# Altium footprint library PcbLib1.PcbLib: 47 footprints (part 3 of 3)
Each footprint in its own frame and in the unit in brackets; x right, y up, seen from the top. Pads: shape width x height; smd on the part's side, far side on the other; paste and mask are expansions set on the pad; w line width, h text height; cw(c..) or ccw(c..) is an arc to the next point about the centre after c.
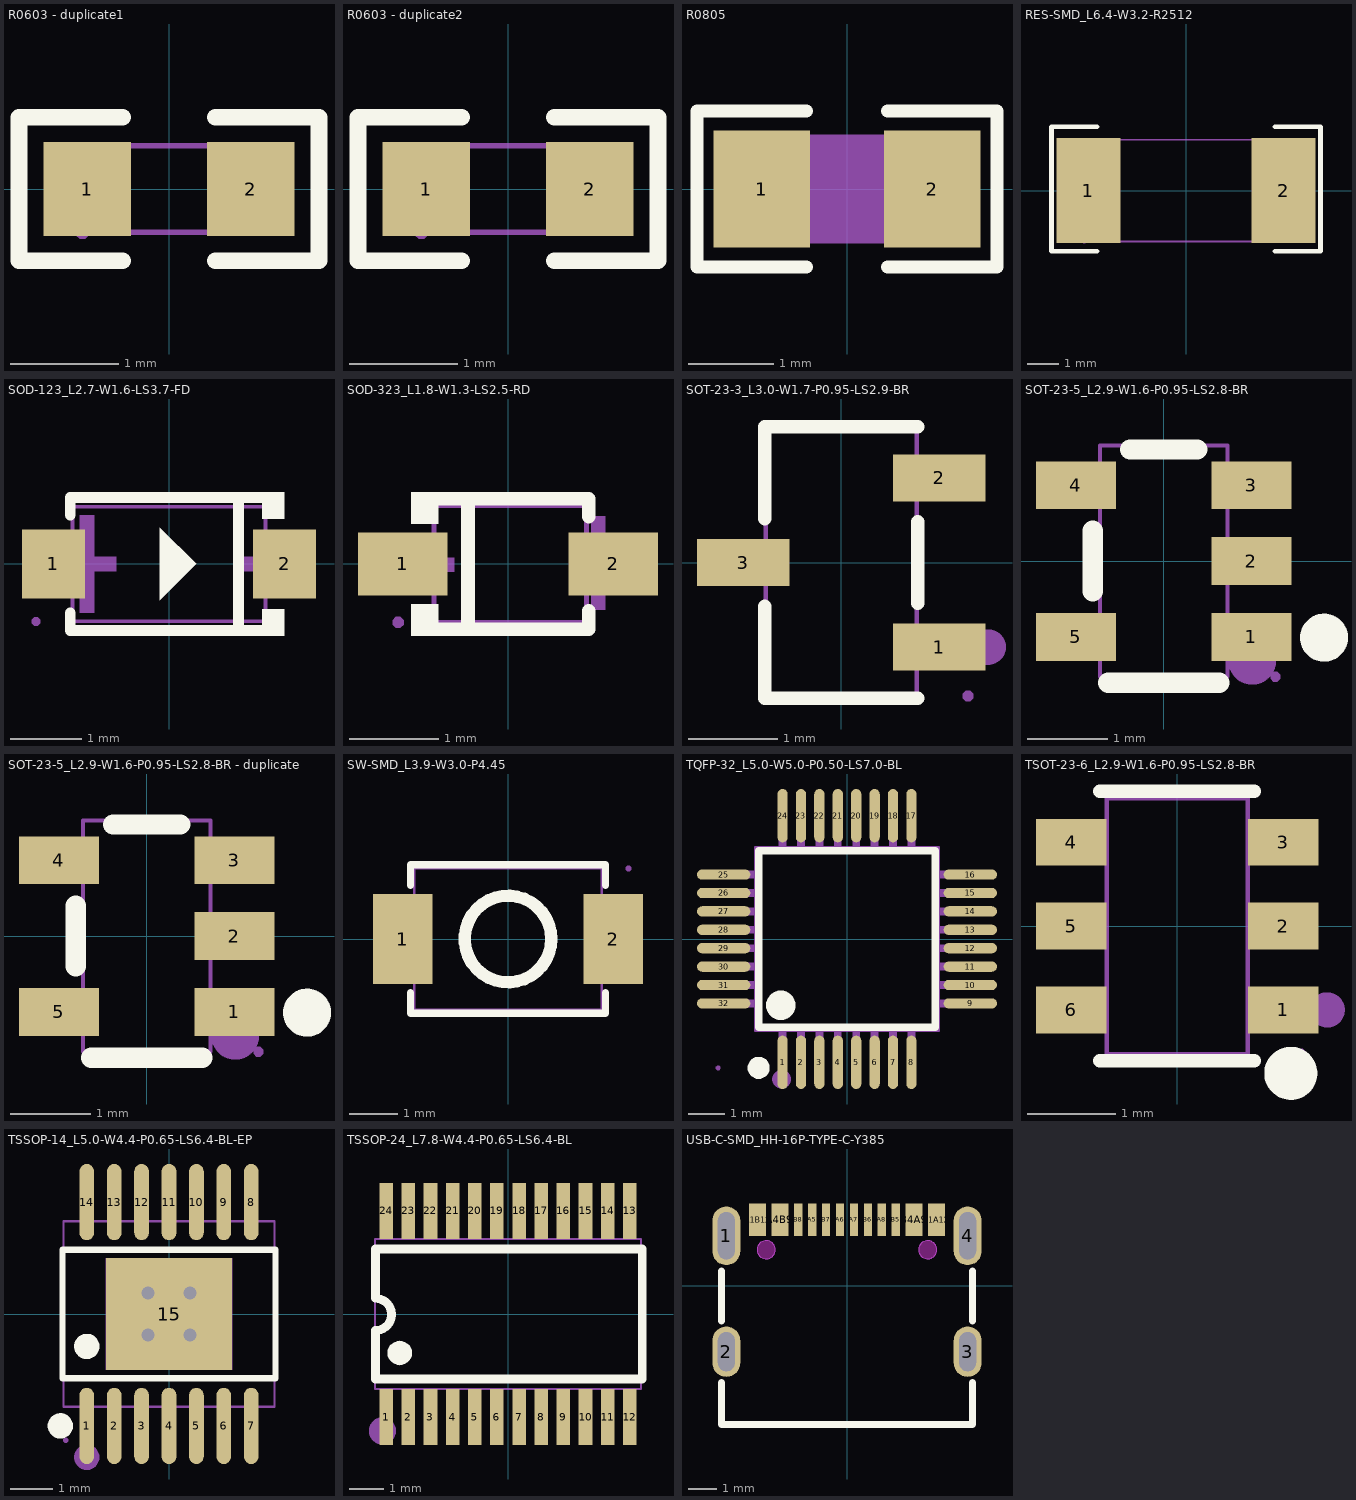
[diagram p2: the footprints below, top view; thin cyan lines are the x and y axes]

## R0603 - duplicate1 [mm]
pads (2):
  rect 0.806x0.864 smd paste-100 mask+0.051: 1(-0.753,0) 2(0.753,0)
Top Overlay:
  lines w0.152: -0.426,-0.661 -1.385,-0.661 -1.385,0.661 -0.426,0.661 ; 0.426,-0.661 1.385,-0.661 1.385,0.661 0.426,0.661
Top Paste:
  region: -1.195,-0.45 -0.395,-0.45 -0.345,-0.4 -0.345,-0.172 -0.715,-0.172 -0.715,0.158 -0.345,0.158 -0.345,0.4 -0.395,0.45 -1.195,0.45 -1.245,0.4 -1.245,-0.4
  region: 1.195,0.45 0.395,0.45 0.345,0.4 0.345,0.172 0.715,0.172 0.715,-0.158 0.345,-0.158 0.345,-0.4 0.395,-0.45 1.195,-0.45 1.245,-0.4 1.245,0.4
Mechanical 6:
  lines w0.051: -0.8,-0.4 0.8,-0.4 0.8,0.4 -0.8,0.4 -0.8,-0.4
Mechanical 8:
  region: -0.74,-0.4 -0.74,-0.425 -0.775,-0.46 -0.825,-0.46 -0.86,-0.425 -0.86,-0.4 -0.86,-0.375 -0.825,-0.34 -0.775,-0.34 -0.74,-0.375 -0.74,-0.4
Mechanical 9:
  region: 0.8,-0.4 0.8,0.4 0.5,0.4 0.5,-0.4
  region: -0.8,-0.4 -0.8,0.4 -0.5,0.4 -0.5,-0.4

## R0603 - duplicate2 [mm]
pads (2):
  rect 0.806x0.864 smd paste-100 mask+0.051: 1(-0.753,0) 2(0.753,0)
Top Overlay:
  lines w0.152: -0.426,-0.661 -1.385,-0.661 -1.385,0.661 -0.426,0.661 ; 0.426,-0.661 1.385,-0.661 1.385,0.661 0.426,0.661
Top Paste:
  region: 1.195,0.45 0.395,0.45 0.345,0.4 0.345,0.172 0.715,0.172 0.715,-0.158 0.345,-0.158 0.345,-0.4 0.395,-0.45 1.195,-0.45 1.245,-0.4 1.245,0.4
  region: -1.195,-0.45 -0.395,-0.45 -0.345,-0.4 -0.345,-0.172 -0.715,-0.172 -0.715,0.158 -0.345,0.158 -0.345,0.4 -0.395,0.45 -1.195,0.45 -1.245,0.4 -1.245,-0.4
Mechanical 6:
  lines w0.051: -0.8,-0.4 -0.8,0.4 0.8,0.4 0.8,-0.4 -0.8,-0.4
Mechanical 8:
  region: -0.74,-0.4 -0.74,-0.425 -0.775,-0.46 -0.825,-0.46 -0.86,-0.425 -0.86,-0.4 -0.86,-0.375 -0.825,-0.34 -0.775,-0.34 -0.74,-0.375 -0.74,-0.4
Mechanical 9:
  region: -0.8,-0.4 -0.8,0.4 -0.5,0.4 -0.5,-0.4
  region: 0.8,-0.4 0.8,0.4 0.5,0.4 0.5,-0.4

## R0805 [mm]
pads (2):
  rect 1.133x1.377 smd paste-100 mask+0.051: 1(-1,0) 2(1,0)
Top Overlay:
  lines w0.152: -0.476,-0.917 -1.761,-0.917 -1.761,0.917 -0.476,0.917 ; 0.476,-0.917 1.761,-0.917 1.761,0.917 0.476,0.917
Top Paste:
  region: 0.45,-0.64 0.45,-0.22 0.895,-0.22 0.895,0.23 0.455,0.23 0.45,0.64 0.5,0.69 1.65,0.69 1.7,0.64 1.7,-0.64 1.65,-0.69 0.5,-0.69
  region: -1.7,-0.64 -1.7,0.64 -1.65,0.69 -0.5,0.69 -0.45,0.64 -0.445,0.23 -0.895,0.23 -0.895,-0.22 -0.455,-0.22 -0.45,-0.64 -0.5,-0.69 -1.65,-0.69
Mechanical 9:
  region: -1,-0.637 -1,0.637 1,0.637 1,-0.637
Mechanical 11:
  region: -0.97,-0.638 -0.97,-0.65 -0.988,-0.668 -1.012,-0.668 -1.03,-0.65 -1.03,-0.638 -1.03,-0.625 -1.012,-0.608 -0.988,-0.608 -0.97,-0.625 -0.97,-0.638
Mechanical 12:
  region: 1,-0.637 1,0.637 0.6,0.637 0.6,-0.637
  region: -1,-0.637 -1,0.637 -0.6,0.637 -0.6,-0.637

## RES-SMD_L6.4-W3.2-R2512 [mm]
pads (2):
  rect 2x3.3 smd: 1(-3.066,0) 2(3.066,0)
Top Overlay:
  lines w0.152: -2.794,-1.905 -4.229,-1.905 -4.229,2.008 -2.794,2.008 ; 2.794,-1.905 4.229,-1.905 4.229,2.008 2.794,2.008
Mechanical 6:
  lines w0.051: -3.2,-1.6 -3.2,1.6 3.2,1.6 3.2,-1.6 -3.2,-1.6
Mechanical 8:
  region: -3.14,-1.6 -3.14,-1.625 -3.175,-1.66 -3.225,-1.66 -3.26,-1.625 -3.26,-1.6 -3.26,-1.575 -3.225,-1.54 -3.175,-1.54 -3.14,-1.575 -3.14,-1.6
Mechanical 9:
  region: -3.199,1.6 -2.299,1.6 -2.299,-1.6 -3.199,-1.6
  region: 2.299,1.6 3.199,1.6 3.199,-1.6 2.299,-1.6

## SOD-123_L2.7-W1.6-LS3.7-FD [mm]
pads (2):
  rect 0.88x0.96 smd: 1(-1.61,0) 2(1.61,0)
Top Overlay:
  region: 0.381,0 -0.127,0.508 -0.127,-0.508
  region: 1.3,1.002 1.3,0.632 1.605,0.632 1.605,1.002
  region: 1.3,-1.003 1.3,-0.632 1.605,-0.633 1.605,-1.003
  lines w0.152: -1.376,-0.683 -1.376,-0.926 1.376,-0.926 ; -1.376,0.683 -1.376,0.926 1.376,0.926 ; 0.967,-0.926 0.967,0.926
Mechanical 2:
  region: -1.245,-0.68 -1.245,0.68 -1.041,0.68 -1.041,-0.68
  region: -1.551,-0.102 -1.551,0.102 -0.735,0.102 -0.735,-0.102
  region: 1.805,-0.102 1.805,0.102 0.989,0.102 0.989,-0.102
Mechanical 6:
  lines w0.051: -1.345,-0.8 -1.345,0.8 1.345,0.8 1.345,-0.8 -1.345,-0.8
Mechanical 7:
  region: -1.511,0.3 -1.511,-0.3 -1.34,-0.3 -1.34,0.3
  region: 1.511,-0.3 1.511,0.3 1.34,0.3 1.34,-0.3
Mechanical 8:
  region: -1.791,-0.8 -1.791,-0.825 -1.826,-0.86 -1.876,-0.86 -1.911,-0.825 -1.911,-0.8 -1.911,-0.775 -1.876,-0.74 -1.826,-0.74 -1.791,-0.775 -1.791,-0.8
Mechanical 9:
  region: -1.851,0.3 -1.501,0.3 -1.501,-0.3 -1.851,-0.3
  region: 1.851,-0.3 1.501,-0.3 1.501,0.3 1.851,0.3

## SOD-323_L1.8-W1.3-LS2.5-RD [mm]
pads (2):
  rect 1x0.7 smd: 1(-1.172,0) 2(1.172,0)
Top Overlay:
  region: -0.775,-0.803 -0.775,-0.45 -1.08,-0.45 -1.08,-0.803
  region: -0.775,0.802 -0.775,0.45 -1.08,0.45 -1.08,0.802
  lines w0.152: -0.851,-0.726 0.901,-0.726 0.901,-0.52 ; -0.851,0.726 0.901,0.726 0.901,0.53 ; -0.447,-0.726 -0.447,0.726
Mechanical 2:
  region: 1.083,0.53 1.083,-0.51 0.927,-0.51 0.927,0.53
  region: 1.315,0.09 1.315,-0.066 0.691,-0.066 0.691,0.09
  region: -1.225,0.07 -1.225,-0.086 -0.601,-0.086 -0.601,0.07
Mechanical 6:
  lines w0.051: -0.825,-0.65 0.875,-0.65 0.875,0.65 -0.825,0.65 -0.825,-0.65
Mechanical 7:
  region: -0.815,0.16 -0.815,-0.16 -0.935,-0.16 -0.935,0.16
  region: 0.985,0.16 0.985,-0.16 0.865,-0.16 0.865,0.16
Mechanical 8:
  region: -1.165,-0.65 -1.165,-0.675 -1.2,-0.71 -1.25,-0.71 -1.285,-0.675 -1.285,-0.65 -1.285,-0.625 -1.25,-0.59 -1.2,-0.59 -1.165,-0.625 -1.165,-0.65
Mechanical 9:
  region: -0.925,0.16 -0.925,-0.16 -1.225,-0.16 -1.225,0.16
  region: 1.275,0.16 1.275,-0.16 0.975,-0.16 0.975,0.16

## SOT-23-3_L3.0-W1.7-P0.95-LS2.9-BR [mm]
pads (3):
  rect 1.037x0.532 smd: 1(1.101,-0.95) 2(1.101,0.95) 3(-1.101,0)
Top Overlay:
  lines w0.152: -0.859,-0.495 -0.859,-1.526 0.859,-1.526 ; -0.859,0.495 -0.859,1.526 0.859,1.526 ; 0.859,-0.455 0.859,0.455
Mechanical 2:
  circle w0.2: c1.65,-0.95 r0.1
Mechanical 6:
  lines w0.051: -0.85,-1.5 -0.85,1.5 0.85,1.5 0.85,-1.5 -0.85,-1.5
Mechanical 7:
  region: 0.815,-1.137 0.815,-0.762 1.01,-0.762 1.01,-1.137
  region: 0.815,0.762 0.815,1.137 1.01,1.137 1.01,0.762
  region: -1.01,-0.188 -1.01,0.188 -0.815,0.188 -0.815,-0.188
Mechanical 8:
  region: 1.485,-1.5 1.485,-1.525 1.45,-1.56 1.4,-1.56 1.365,-1.525 1.365,-1.5 1.365,-1.475 1.4,-1.44 1.45,-1.44 1.485,-1.475 1.485,-1.5
Mechanical 9:
  region: 1,-1.137 1,-0.762 1.425,-0.762 1.425,-1.137
  region: 1,0.762 1,1.137 1.425,1.137 1.425,0.762
  region: -1.425,-0.188 -1.425,0.188 -1,0.188 -1,-0.188

## SOT-23-5_L2.9-W1.6-P0.95-LS2.8-BR [mm]
pads (5):
  rect 1x0.6 smd paste+0 mask+0.05: 1(1.1,-0.95) 2(1.1,0) 3(1.1,0.95) 4(-1.1,0.95) 5(-1.1,-0.95)
Top Overlay:
  circle w0.3: c2.01,-0.96 r0.15
  lines w0.254: -0.889,-0.381 -0.889,0.381 ; -0.699,-1.524 0.698,-1.524 ; -0.422,1.397 0.422,1.397
Mechanical 2:
  circle w0.3: c1.11,-1.25 r0.15
Mechanical 6:
  lines w0.051: -0.8,-1.45 -0.8,1.45 0.8,1.45 0.8,-1.45 -0.8,-1.45
Mechanical 7:
  region: 0.96,-0.2 0.79,-0.2 0.79,0.2 0.96,0.2
  region: 0.96,0.75 0.79,0.75 0.79,1.15 0.96,1.15
  region: 0.96,-1.15 0.79,-1.15 0.79,-0.75 0.96,-0.75
  region: -0.79,0.75 -0.96,0.75 -0.96,1.15 -0.79,1.15
  region: -0.79,-1.15 -0.96,-1.15 -0.96,-0.75 -0.79,-0.75
Mechanical 8:
  region: 1.46,-1.45 1.46,-1.475 1.425,-1.51 1.375,-1.51 1.34,-1.475 1.34,-1.45 1.34,-1.425 1.375,-1.39 1.425,-1.39 1.46,-1.425 1.46,-1.45
Mechanical 9:
  region: 1.4,-0.2 0.95,-0.2 0.95,0.2 1.4,0.2
  region: 1.4,0.75 0.95,0.75 0.95,1.15 1.4,1.15
  region: 1.4,-1.15 0.95,-1.15 0.95,-0.75 1.4,-0.75
  region: -0.95,0.75 -1.4,0.75 -1.4,1.15 -0.95,1.15
  region: -0.95,-1.15 -1.4,-1.15 -1.4,-0.75 -0.95,-0.75

## SOT-23-5_L2.9-W1.6-P0.95-LS2.8-BR - duplicate [mm]
pads (5):
  rect 1x0.6 smd paste+0 mask+0.05: 1(1.1,-0.95) 2(1.1,0) 3(1.1,0.95) 4(-1.1,0.95) 5(-1.1,-0.95)
Top Overlay:
  circle w0.3: c2.01,-0.96 r0.15
  lines w0.254: -0.889,-0.381 -0.889,0.381 ; -0.699,-1.524 0.698,-1.524 ; -0.422,1.397 0.422,1.397
Mechanical 2:
  circle w0.3: c1.11,-1.25 r0.15
Mechanical 6:
  lines w0.051: -0.8,-1.45 0.8,-1.45 0.8,1.45 -0.8,1.45 -0.8,-1.45
Mechanical 7:
  region: -0.79,-1.15 -0.96,-1.15 -0.96,-0.75 -0.79,-0.75
  region: -0.79,0.75 -0.96,0.75 -0.96,1.15 -0.79,1.15
  region: 0.96,-1.15 0.79,-1.15 0.79,-0.75 0.96,-0.75
  region: 0.96,0.75 0.79,0.75 0.79,1.15 0.96,1.15
  region: 0.96,-0.2 0.79,-0.2 0.79,0.2 0.96,0.2
Mechanical 8:
  region: 1.46,-1.45 1.46,-1.475 1.425,-1.51 1.375,-1.51 1.34,-1.475 1.34,-1.45 1.34,-1.425 1.375,-1.39 1.425,-1.39 1.46,-1.425 1.46,-1.45
Mechanical 9:
  region: -0.95,-1.15 -1.4,-1.15 -1.4,-0.75 -0.95,-0.75
  region: -0.95,0.75 -1.4,0.75 -1.4,1.15 -0.95,1.15
  region: 1.4,-1.15 0.95,-1.15 0.95,-0.75 1.4,-0.75
  region: 1.4,0.75 0.95,0.75 0.95,1.15 1.4,1.15
  region: 1.4,-0.2 0.95,-0.2 0.95,0.2 1.4,0.2

## SW-SMD_L3.9-W3.0-P4.45 [mm]
pads (2):
  rect 1.23x1.86 smd: 1(-2.185,0) 2(2.185,0)
Top Overlay:
  circle w0.254: c0,0 r0.9
  lines w0.152: -2.026,-1.11 -2.026,-1.541 2.026,-1.541 2.026,-1.11 ; -2.026,1.11 -2.026,1.541 2.026,1.541 2.026,1.11
Mechanical 6:
  lines w0.051: -1.95,-1.465 -1.95,1.465 1.95,1.465 1.95,-1.465 -1.95,-1.465
Mechanical 8:
  region: 2.56,1.465 2.56,1.44 2.525,1.405 2.475,1.405 2.44,1.44 2.44,1.465 2.44,1.49 2.475,1.525 2.525,1.525 2.56,1.49 2.56,1.465
Mechanical 9:
  region: -2.5,0.65 -2.5,-0.65 -1.6,-0.65 -1.6,0.65
  region: 2.5,0.65 2.5,-0.65 1.6,-0.65 1.6,0.65

## TQFP-32_L5.0-W5.0-P0.50-LS7.0-BL [mm]
pads (32):
  oval 0.28x1.45 smd: 1(-1.75,-3.35) 2(-1.25,-3.35) 3(-0.75,-3.35) 4(-0.25,-3.35) 5(0.25,-3.35) 6(0.75,-3.35) 7(1.25,-3.35) 8(1.75,-3.35) 17(1.75,3.35) 18(1.25,3.35) 19(0.75,3.35) 20(0.25,3.35) 21(-0.25,3.35) 22(-0.75,3.35) 23(-1.25,3.35) 24(-1.75,3.35)
  oval 1.45x0.28 smd: 9(3.35,-1.75) 10(3.35,-1.25) 11(3.35,-0.75) 12(3.35,-0.25) 13(3.35,0.25) 14(3.35,0.75) 15(3.35,1.25) 16(3.35,1.75) 25(-3.35,1.75) 26(-3.35,1.25) 27(-3.35,0.75) 28(-3.35,0.25) 29(-3.35,-0.25) 30(-3.35,-0.75) 31(-3.35,-1.25) 32(-3.35,-1.75)
Top Overlay:
  lines w0.2: -2.4,-2.4 -2.4,2.4 2.4,2.4 2.4,-2.4 -2.4,-2.4
  lines w0.3: -2.4,-3.35 ccw(c-2.399,-3.5) -2.398,-3.35
  lines w0.4: -1.801,-1.6 ccw(c-1.798,-1.8) -1.796,-1.6
Mechanical 2:
  circle w0.254: c-1.778,-3.81 r0.127
Mechanical 6:
  lines w0.051: -2.5,-2.5 -2.5,2.5 2.5,2.5 2.5,-2.5 -2.5,-2.5
Mechanical 7:
  drawing of 32 lines, arcs and shapes, not listed
Mechanical 8:
  region: -3.44,-3.5 -3.44,-3.525 -3.475,-3.56 -3.525,-3.56 -3.56,-3.525 -3.56,-3.5 -3.56,-3.475 -3.525,-3.44 -3.475,-3.44 -3.44,-3.475 -3.44,-3.5
Mechanical 9:
  drawing of 32 lines, arcs and shapes, not listed

## TSOT-23-6_L2.9-W1.6-P0.95-LS2.8-BR [mm]
pads (6):
  rect 0.8x0.532 smd: 1(1.2,-0.95) 2(1.2,0) 3(1.2,0.95) 4(-1.2,0.95) 5(-1.2,0) 6(-1.2,-0.95)
Top Overlay:
  circle w0.3: c1.287,-1.669 r0.15
  lines w0.152: -0.876,-1.526 0.876,-1.526 ; -0.876,1.526 0.876,1.526
Mechanical 2:
  circle w0.2: c1.7,-0.95 r0.1
Mechanical 6:
  lines w0.051: -0.8,-1.45 0.8,-1.45 0.8,1.45 -0.8,1.45 -0.8,-1.45
Mechanical 7:
  region: -0.96,-1.15 -0.96,-0.75 -0.79,-0.75 -0.79,-1.15
  region: -0.96,-0.2 -0.96,0.2 -0.79,0.2 -0.79,-0.2
  region: -0.96,0.75 -0.96,1.15 -0.79,1.15 -0.79,0.75
  region: 0.79,0.75 0.79,1.15 0.96,1.15 0.96,0.75
  region: 0.79,-0.2 0.79,0.2 0.96,0.2 0.96,-0.2
  region: 0.79,-1.15 0.79,-0.75 0.96,-0.75 0.96,-1.15
Mechanical 8:
  region: 1.46,-1.45 1.46,-1.475 1.425,-1.51 1.375,-1.51 1.34,-1.475 1.34,-1.45 1.34,-1.425 1.375,-1.39 1.425,-1.39 1.46,-1.425 1.46,-1.45
Mechanical 9:
  region: -0.95,-1.15 -0.95,-0.75 -1.4,-0.75 -1.4,-1.15
  region: -0.95,-0.2 -0.95,0.2 -1.4,0.2 -1.4,-0.2
  region: -0.95,0.75 -0.95,1.15 -1.4,1.15 -1.4,0.75
  region: 0.95,0.75 0.95,1.15 1.4,1.15 1.4,0.75
  region: 0.95,-0.2 0.95,0.2 1.4,0.2 1.4,-0.2
  region: 0.95,-1.15 0.95,-0.75 1.4,-0.75 1.4,-1.15

## TSSOP-14_L5.0-W4.4-P0.65-LS6.4-BL-EP [mm]
pads (15):
  oval 0.35x1.809 smd: 1(-1.95,-2.655) 2(-1.3,-2.655) 3(-0.65,-2.655) 4(0,-2.655) 5(0.65,-2.655) 6(1.3,-2.655) 7(1.95,-2.655) 8(1.95,2.655) 9(1.3,2.655) 10(0.65,2.655) 11(0,2.655) 12(-0.65,2.655) 13(-1.3,2.655) 14(-1.95,2.655)
  rect 3x2.65 smd: 15(0,0)
via 0.495,-0.495 diameter 0.61 hole 0.305
via -0.495,-0.495 diameter 0.61 hole 0.305
via -0.495,0.495 diameter 0.61 hole 0.305
via 0.495,0.495 diameter 0.61 hole 0.305
Top Overlay:
  circle w0.3: c-2.577,-2.655 r0.15
  circle w0.3: c-1.95,-0.769 r0.15
  lines w0.152: -2.526,-1.521 2.526,-1.521 2.526,1.521 -2.526,1.521 -2.526,-1.521
Mechanical 2:
  circle w0.3: c-1.95,-3.4 r0.15
Mechanical 6:
  lines w0.051: -2.5,-2.2 2.5,-2.2 2.5,2.2 -2.5,2.2 -2.5,-2.2
Mechanical 7:
  region: 1.825,2.37 1.825,1.94 2.075,1.94 2.075,2.37
  region: 1.175,2.37 1.175,1.94 1.425,1.94 1.425,2.37
  region: 0.525,2.37 0.525,1.94 0.775,1.94 0.775,2.37
  region: -0.125,2.37 -0.125,1.94 0.125,1.94 0.125,2.37
  region: -0.775,2.37 -0.775,1.94 -0.525,1.94 -0.525,2.37
  region: -1.425,2.37 -1.425,1.94 -1.175,1.94 -1.175,2.37
  region: -2.075,2.37 -2.075,1.94 -1.825,1.94 -1.825,2.37
  region: 1.825,-2.37 1.825,-1.94 2.075,-1.94 2.075,-2.37
  region: 1.175,-2.37 1.175,-1.94 1.425,-1.94 1.425,-2.37
  region: 0.525,-2.37 0.525,-1.94 0.775,-1.94 0.775,-2.37
  region: -0.125,-2.37 -0.125,-1.94 0.125,-1.94 0.125,-2.37
  region: -0.775,-2.37 -0.775,-1.94 -0.525,-1.94 -0.525,-2.37
  region: -1.425,-2.37 -1.425,-1.94 -1.175,-1.94 -1.175,-2.37
  region: -2.075,-2.37 -2.075,-1.94 -1.825,-1.94 -1.825,-2.37
Mechanical 8:
  region: -2.39,-3 -2.39,-3.025 -2.425,-3.06 -2.475,-3.06 -2.51,-3.025 -2.51,-3 -2.51,-2.975 -2.475,-2.94 -2.425,-2.94 -2.39,-2.975 -2.39,-3
Mechanical 9:
  region: -1.5,-1.325 -1.5,1.325 1.5,1.325 1.5,-1.325
  region: 1.825,3 1.825,2.36 2.075,2.36 2.075,3
  region: 1.175,3 1.175,2.36 1.425,2.36 1.425,3
  region: 0.525,3 0.525,2.36 0.775,2.36 0.775,3
  region: -0.125,3 -0.125,2.36 0.125,2.36 0.125,3
  region: -0.775,3 -0.775,2.36 -0.525,2.36 -0.525,3
  region: -1.425,3 -1.425,2.36 -1.175,2.36 -1.175,3
  region: -2.075,3 -2.075,2.36 -1.825,2.36 -1.825,3
  region: 1.825,-3 1.825,-2.36 2.075,-2.36 2.075,-3
  region: 1.175,-3 1.175,-2.36 1.425,-2.36 1.425,-3
  region: 0.525,-3 0.525,-2.36 0.775,-2.36 0.775,-3
  region: -0.125,-3 -0.125,-2.36 0.125,-2.36 0.125,-3
  region: -0.775,-3 -0.775,-2.36 -0.525,-2.36 -0.525,-3
  region: -1.425,-3 -1.425,-2.36 -1.175,-2.36 -1.175,-3
  region: -2.075,-3 -2.075,-2.36 -1.825,-2.36 -1.825,-3

## TSSOP-24_L7.8-W4.4-P0.65-LS6.4-BL [mm]
pads (24):
  rect 0.4x1.65 smd: 1(-3.575,-3.023) 2(-2.925,-3.023) 3(-2.275,-3.023) 4(-1.625,-3.023) 5(-0.975,-3.023) 6(-0.325,-3.023) 7(0.325,-3.023) 8(0.975,-3.023) 9(1.625,-3.023) 10(2.275,-3.023) 11(2.925,-3.023) 12(3.575,-3.023) 13(3.575,3.023) 14(2.925,3.023) 15(2.275,3.023) 16(1.625,3.023) 17(0.975,3.023) 18(0.325,3.023) 19(-0.325,3.023) 20(-0.975,3.023) 21(-1.625,3.023) 22(-2.275,3.023) 23(-2.925,3.023) 24(-3.575,3.023)
Top Overlay:
  region: -3.529,-1.143 -3.52,-1.064 -3.494,-0.989 -3.452,-0.922 -3.396,-0.866 -3.329,-0.824 -3.254,-0.798 -3.175,-0.789 -3.096,-0.798 -3.021,-0.824 -2.954,-0.866 -2.898,-0.922 -2.856,-0.989 -2.83,-1.064 -2.821,-1.143 -2.83,-1.222 -2.856,-1.297 -2.898,-1.364 -2.954,-1.42 -3.021,-1.462 -3.096,-1.488 -3.175,-1.497 -3.254,-1.488 -3.329,-1.462 -3.396,-1.42 -3.452,-1.364 -3.494,-1.297 -3.52,-1.222
  lines w0.254: -3.886,0.457 cw(c-3.886,-0.013) -3.886,-0.483 -3.886,-1.753 -3.886,-1.905 3.937,-1.905 3.937,1.905 -3.886,1.905 -3.886,1.753 -3.886,0.483
Mechanical 2:
  circle w0.4: c-3.683,-3.429 r0.2
Mechanical 6:
  lines w0.051: -3.9,-2.2 -3.9,2.2 3.9,2.2 3.9,-2.2 -3.9,-2.2
Mechanical 7:
  region: -0.225,2.588 -0.425,2.588 -0.425,2.188 -0.225,2.188
  region: -0.875,2.588 -1.075,2.588 -1.075,2.188 -0.875,2.188
  region: -1.525,2.588 -1.725,2.588 -1.725,2.188 -1.525,2.188
  region: -2.175,2.588 -2.375,2.588 -2.375,2.188 -2.175,2.188
  region: -2.825,2.588 -3.025,2.588 -3.025,2.188 -2.825,2.188
  region: -3.475,2.588 -3.675,2.588 -3.675,2.188 -3.475,2.188
  region: 3.675,2.588 3.475,2.588 3.475,2.188 3.675,2.188
  region: 3.025,2.588 2.825,2.588 2.825,2.188 3.025,2.188
  region: 2.375,2.588 2.175,2.588 2.175,2.188 2.375,2.188
  region: 1.725,2.588 1.525,2.588 1.525,2.188 1.725,2.188
  region: 1.075,2.588 0.875,2.588 0.875,2.188 1.075,2.188
  region: 0.425,2.588 0.225,2.588 0.225,2.188 0.425,2.188
  region: 0.225,-2.588 0.425,-2.588 0.425,-2.188 0.225,-2.188
  region: 0.875,-2.588 1.075,-2.588 1.075,-2.188 0.875,-2.188
  region: 1.525,-2.588 1.725,-2.588 1.725,-2.188 1.525,-2.188
  region: 2.175,-2.588 2.375,-2.588 2.375,-2.188 2.175,-2.188
  region: 2.825,-2.588 3.025,-2.588 3.025,-2.188 2.825,-2.188
  region: 3.475,-2.588 3.675,-2.588 3.675,-2.188 3.475,-2.188
  region: -3.675,-2.588 -3.475,-2.588 -3.475,-2.188 -3.675,-2.188
  region: -3.025,-2.588 -2.825,-2.588 -2.825,-2.188 -3.025,-2.188
  region: -2.375,-2.588 -2.175,-2.588 -2.175,-2.188 -2.375,-2.188
  region: -1.725,-2.588 -1.525,-2.588 -1.525,-2.188 -1.725,-2.188
  region: -1.075,-2.588 -0.875,-2.588 -0.875,-2.188 -1.075,-2.188
  region: -0.425,-2.588 -0.225,-2.588 -0.225,-2.188 -0.425,-2.188
Mechanical 8:
  region: -3.84,-3.186 -3.84,-3.211 -3.875,-3.246 -3.925,-3.246 -3.96,-3.211 -3.96,-3.186 -3.96,-3.161 -3.925,-3.126 -3.875,-3.126 -3.84,-3.161 -3.84,-3.186
Mechanical 9:
  region: -0.225,2.586 -0.425,2.586 -0.425,3.186 -0.225,3.186
  region: -0.875,2.586 -1.075,2.586 -1.075,3.186 -0.875,3.186
  region: -1.525,2.586 -1.725,2.586 -1.725,3.186 -1.525,3.186
  region: -2.175,2.586 -2.375,2.586 -2.375,3.186 -2.175,3.186
  region: -2.825,2.586 -3.025,2.586 -3.025,3.186 -2.825,3.186
  region: -3.475,2.586 -3.675,2.586 -3.675,3.186 -3.475,3.186
  region: 3.675,2.586 3.475,2.586 3.475,3.186 3.675,3.186
  region: 3.025,2.586 2.825,2.586 2.825,3.186 3.025,3.186
  region: 2.375,2.586 2.175,2.586 2.175,3.186 2.375,3.186
  region: 1.725,2.586 1.525,2.586 1.525,3.186 1.725,3.186
  region: 1.075,2.586 0.875,2.586 0.875,3.186 1.075,3.186
  region: 0.425,2.586 0.225,2.586 0.225,3.186 0.425,3.186
  region: 0.225,-2.586 0.425,-2.586 0.425,-3.186 0.225,-3.186
  region: 0.875,-2.586 1.075,-2.586 1.075,-3.186 0.875,-3.186
  region: 1.525,-2.586 1.725,-2.586 1.725,-3.186 1.525,-3.186
  region: 2.175,-2.586 2.375,-2.586 2.375,-3.186 2.175,-3.186
  region: 2.825,-2.586 3.025,-2.586 3.025,-3.186 2.825,-3.186
  region: 3.475,-2.586 3.675,-2.586 3.675,-3.186 3.475,-3.186
  region: -3.675,-2.586 -3.475,-2.586 -3.475,-3.186 -3.675,-3.186
  region: -3.025,-2.586 -2.825,-2.586 -2.825,-3.186 -3.025,-3.186
  region: -2.375,-2.586 -2.175,-2.586 -2.175,-3.186 -2.375,-3.186
  region: -1.725,-2.586 -1.525,-2.586 -1.525,-3.186 -1.725,-3.186
  region: -1.075,-2.586 -0.875,-2.586 -0.875,-3.186 -1.075,-3.186
  region: -0.425,-2.586 -0.225,-2.586 -0.225,-3.186 -0.425,-3.186

## USB-C-SMD_HH-16P-TYPE-C-Y385 [mm]
pads (16):
  oval 1x2.1 hole 0.6 slot 1.7 at 90 deg copper offset 0,0 paste-2539.97 mask+0.051: 1(-4.32,1.787) 4(4.32,1.787)
  oval 1x1.8 hole 0.6 slot 1.4 at 90 deg paste-2539.97 mask+0.051: 2(-4.32,-2.363) 3(4.32,-2.363)
  rect 0.6x1.15 smd paste+0 mask+0.05: A1B12(-3.2,2.363) A4B9(-2.4,2.363) B1A12(3.2,2.363) B4A9(2.4,2.363)
  rect 0.3x1.15 smd paste+0 mask+0.051: A5(-1.25,2.363) A6(-0.25,2.363) A7(0.25,2.363) A8(1.25,2.363) B5(1.75,2.363) B6(0.75,2.363) B7(-0.75,2.363) B8(-1.75,2.363)
Top Overlay:
  lines w0.254: -4.5,-3.471 -4.5,-4.962 4.5,-4.962 4.5,-3.471 ; -4.5,-1.254 -4.5,0.529 ; 4.5,-1.254 4.5,0.529
Keep-Out Layer:
  board cut-out: 3.215,1.287 3.215,1.223 3.166,1.103 3.074,1.012 2.955,0.962 2.825,0.962 2.706,1.012 2.615,1.103 2.565,1.223 2.565,1.287 2.565,1.352 2.615,1.471 2.706,1.563 2.825,1.612 2.955,1.612 3.074,1.563 3.166,1.471 3.215,1.352 3.215,1.287
  board cut-out: -2.565,1.287 -2.565,1.223 -2.614,1.103 -2.706,1.012 -2.825,0.962 -2.955,0.962 -3.074,1.012 -3.166,1.103 -3.215,1.223 -3.215,1.287 -3.215,1.352 -3.166,1.471 -3.074,1.563 -2.955,1.612 -2.825,1.612 -2.706,1.563 -2.614,1.471 -2.565,1.352 -2.565,1.287
Keep-Out Layer:
  circle w0.003: c2.89,1.287 r0.325
  circle w0.003: c-2.89,1.287 r0.325
  region: 3.215,1.287 3.206,1.21 3.178,1.136 3.133,1.072 3.075,1.02 3.005,0.984 2.929,0.965 2.851,0.965 2.775,0.984 2.705,1.02 2.647,1.072 2.602,1.136 2.574,1.21 2.565,1.287 2.574,1.365 2.602,1.438 2.647,1.503 2.705,1.555 2.775,1.591 2.851,1.61 2.929,1.61 3.005,1.591 3.075,1.555 3.133,1.503 3.178,1.438 3.206,1.365
  region: 3.215,1.287 3.215,1.223 3.166,1.103 3.074,1.012 2.955,0.962 2.825,0.962 2.706,1.012 2.615,1.103 2.565,1.223 2.565,1.287 2.565,1.352 2.615,1.471 2.706,1.563 2.825,1.612 2.955,1.612 3.074,1.563 3.166,1.471 3.215,1.352 3.215,1.287
  region: -2.565,1.287 -2.574,1.21 -2.602,1.136 -2.647,1.072 -2.705,1.02 -2.775,0.984 -2.851,0.965 -2.929,0.965 -3.005,0.984 -3.075,1.02 -3.133,1.072 -3.178,1.136 -3.206,1.21 -3.215,1.287 -3.206,1.365 -3.178,1.438 -3.133,1.503 -3.075,1.555 -3.005,1.591 -2.929,1.61 -2.851,1.61 -2.775,1.591 -2.705,1.555 -2.647,1.503 -2.602,1.438 -2.574,1.365
  region: -2.565,1.287 -2.565,1.223 -2.614,1.103 -2.706,1.012 -2.825,0.962 -2.955,0.962 -3.074,1.012 -3.166,1.103 -3.215,1.223 -3.215,1.287 -3.215,1.352 -3.166,1.471 -3.074,1.563 -2.955,1.612 -2.825,1.612 -2.706,1.563 -2.614,1.471 -2.565,1.352 -2.565,1.287
Mechanical 1:
  circle w0.003: c2.89,1.287 r0.325
  circle w0.003: c-2.89,1.287 r0.325
Mechanical 11:
  region: -4.44,2.265 -4.44,2.252 -4.458,2.235 -4.483,2.235 -4.5,2.252 -4.5,2.265 -4.5,2.277 -4.483,2.295 -4.458,2.295 -4.44,2.277 -4.44,2.265